# Altium schematic symbol library Переключатели.SchLib: 2 symbols
Pins are listed as number, name and electrical type; pins without a type are passive.

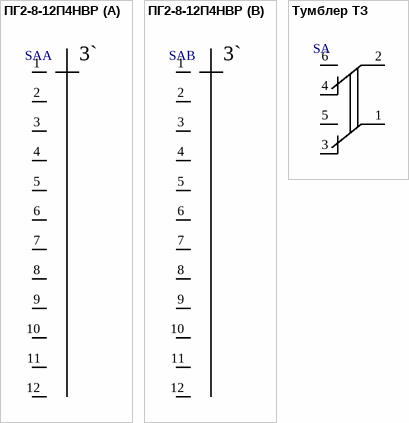
[diagram p0: symbols ПГ2-8-12П4НВР to Тумблер ТЗ]

## ПГ2-8-12П4НВР
designator SA  (value not drawn)
Малогабаритные галетные переключатели поворотного типа предназначены для работы в / электрических цепях постоянного и переменного тока в радиоэлектронной аппаратуре. Изготавливаются во / всеклиматическом исполнении, предназначены для объемного монтажа. Количество плат от 1 до 4, которые / обеспечивают от 2 до 12 положений и от 1 до 16 направлений. Поставляются с ручкой К или Р.
part A pins: 1, 2, 3, 3`, 4, 5, 6, 7, 8, 9, 10, 11, 12
part B pins: 1, 2, 3, 3`, 4, 5, 6, 7, 8, 9, 10, 11, 12

## Тумблер ТЗ
designator SA, comment ПГ2-8-12П4НВР  (value not drawn)
Тумблер является изделием ручного управления и предназначен для объемного монтажа.
pins: 1, 2, 3, 4, 5, 6